# Altium schematic symbol library DT10965_MOTOR_CONTROLLER.SCHLIB: 85 symbols (part 1 of 2)
Pins are listed as number, name and electrical type; pins without a type are passive.

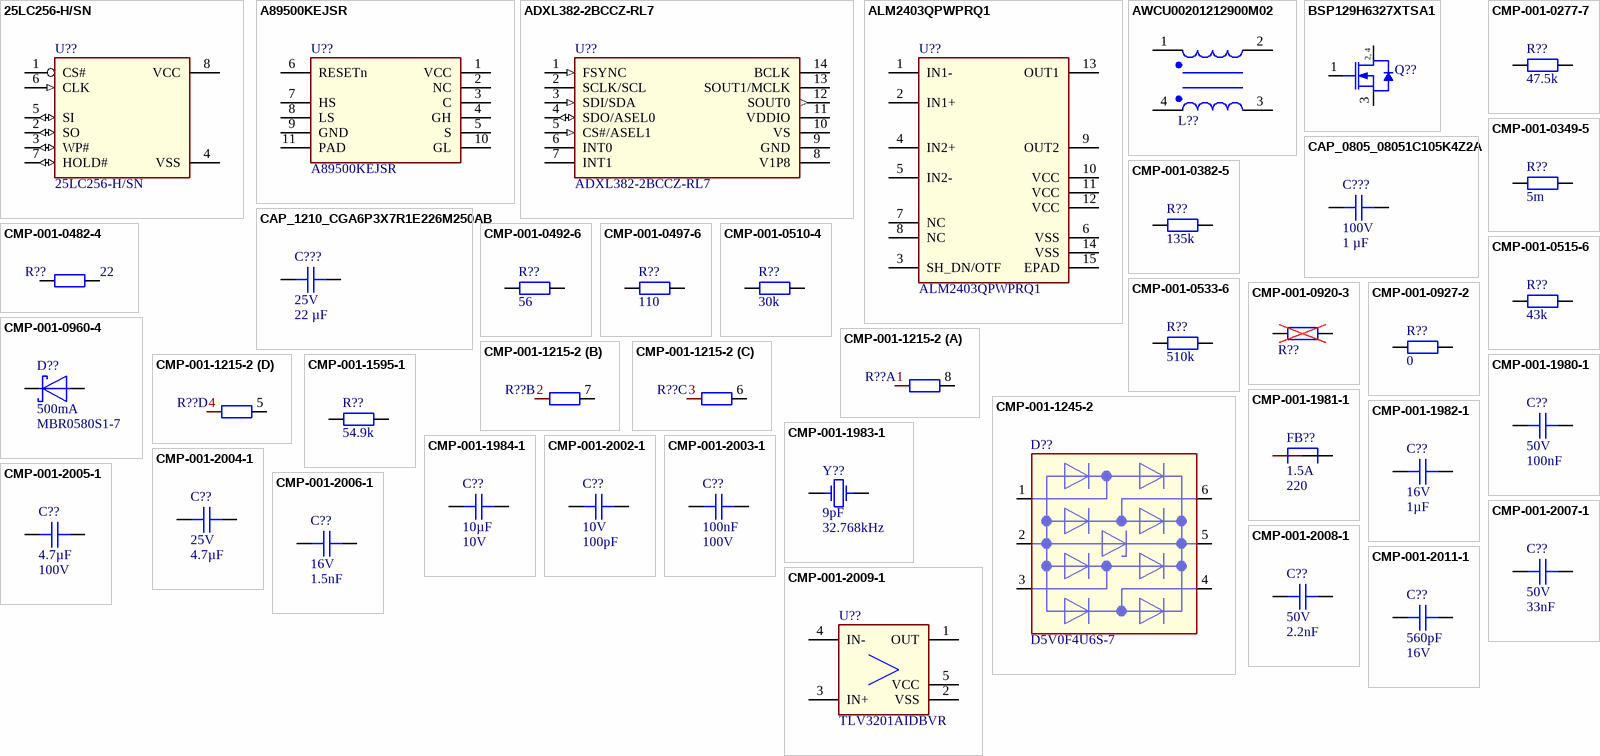
[diagram p0: symbols 25LC256-H/SN to CMP-001-2011-1]

## 25LC256-H/SN
designator U??
IC EEPROM 256KBIT SPI 5MHZ 8SOIC; Manufacturer: Microchip Technology; MPN: 25LC256-H/SN
footprint SOIC8P127_490X600X175L70X41 (SO-8 4.9X6X1.75 p1.27 (JEDEC MS-012-AA))
pins: 1 CS#, 2 SO (io), 3 WP# (io), 4 VSS, 5 SI (io), 6 CLK (in), 7 HOLD# (io), 8 VCC

## A89500KEJSR
designator U??
IC GATE DRVR HALF-BRIDGE 10DFN; Manufacturer: Allegro MicroSystems; MPN: A89500KEJSR
footprint A89500KEJSR
pins: 1 VCC (power), 2 NC, 3 C, 4 GH, 5 S, 6 RESETn, 7 HS, 8 LS, 9 GND (power), 10 GL, 11 PAD

## ADXL382-2BCCZ-RL7
designator U??
Accelerometer X, Y, Z Axis ±15g, 30g, 60g 50Hz ~ 8kHz 14-LGA (2.9x2.8); Manufacturer: Analog Devices Inc.; MPN: ADXL382-2BCCZ-RL7
footprint 14-LGA (2.9x2.8) (ADXL382-2BCCZ-RL7)
pins: 1 FSYNC (in), 2 SCLK/SCL, 3 SDI/SDA (in), 4 SDO/ASEL0 (io), 5 CS#/ASEL1 (in), 6 INT0, 7 INT1, 8 V1P8 (power), 9 GND (power), 10 VS (power), 11 VDDIO (power), 12 SOUT0 (out), 13 SOUT1/MCLK, 14 BCLK

## ALM2403QPWPRQ1
designator U??
IC OPAMP GP 2 CIRCUIT 14HTSSOP; Manufacturer: Texas Instruments; MPN: ALM2403QPWPRQ1
footprint 14-HTSSOP
pins: 1 IN1-, 2 IN1+, 3 SH_DN/OTF, 4 IN2+, 5 IN2-, 6 VSS, 7 NC, 8 NC, 9 OUT2, 10 VCC, 11 VCC, 12 VCC, 13 OUT1, 14 VSS, 15 EPAD

## AWCU00201212900M02
designator L??, comment 2 Line Common Mode Choke  (value not drawn)
CMC 330MA 2LN 90OHM SMD AEC-Q200; Manufacturer: Pulse Electronics; MPN: AWCU00201212900M02
footprint DLW21HN900SQ2L
pins: 1, 2, 3, 4

## BSP129H6327XTSA1
designator Q??  (value not drawn)
MOSFET N-CH 240V 350MA SOT223-4; Manufacturer: Infineon Technologies; MPN: BSP129H6327XTSA1
footprint SOT-223
pins: 1 GATE, 2 DRAIN, 3 SOURCE, 4 DRAIN
text: 2, 4

## CAP_0805_08051C105K4Z2A
designator C???, comment Voltage Rating: 100V  Capacitance: 1 µF  (hidden comment: 08051C105K4Z2A)
CAP CER 1UF 100V X7R 0805; Manufacturer: KYOCERA AVX; Op Temp min: -55°C; Op Temp max: 125°C; Tolerance: ±10%; ComponentLink3URL: https://www.digikey.at/en/products/detail/kyocera-avx/08051C105K4Z2A/9374704; ComponentLink1Description: Datasheet; MPN: 08051C105K4Z2A; Lead Spacing: -; ComponentLink2Description: Mouser; Ratings: AEC-Q200; Size: 2.01mm x 1.25mm; ComponentLink1URL: https://mm.digikey.com/Volume0/opasdata/d220001/medias/docus/6397/AutoMLCC-2952695-DS.pdf; Package: 0805 (2012 Metric); Dielectric: X7R; ComponentLink3Description: Digikey; ComponentLink2URL: https://eu.mouser.com/ProductDetail/KYOCERA-AVX/08051C105K4Z2A?qs=BZBei1rCqCB2WSMz8IvwsA%3D%3D; Height max: 900µm; Mounting Type: SM; Component Type: Ceramic Capacitor
footprint CAP_08051A0R8CAT2A_AVX
pins: 1, 2

## CAP_1210_CGA6P3X7R1E226M250AB
designator C???, comment Voltage Rating: 25V  Capacitance: 22 µF  (hidden comment: CGA6P3X7R1E226M250AB)
CAP CER 22UF 25V X7R 1210; Manufacturer: TDK Corporation; Op Temp max: 125°C; Op Temp min: -55°C; Tolerance: ±20%; ComponentLink3URL: https://www.digikey.at/en/products/detail/tdk-corporation/CGA6P3X7R1E226M250AB/9555472; MPN: CGA6P3X7R1E226M250AB; ComponentLink1URL: https://product.tdk.com/system/files/dam/doc/product/capacitor/ceramic/mlcc/catalog/mlcc_automotive_general_en.pdf; Package: 1210 (3225 Metric); Size: 3.20mm x 2.50mm; Height max: 2.80mm; Mounting Type: SM; ComponentLink1Description: Datasheet; ComponentLink3Description: Digikey; Ratings: AEC-Q200; Dielectric: X7R; Lead Spacing: -; Component Type: Ceramic Capacitor; ComponentLink4Description: Mouser; ComponentLink4URL: https://eu.mouser.com/ProductDetail/TDK/CGA6P3X7R1E226M250AB?qs=w%2Fv1CP2dgqrKXzeuDypldA%3D%3D
footprint CAPC3225X270N
pins: 1, 2

## CMP-001-0277-7
designator R??, comment Resistance: 47.5k  (hidden comment: RC0402FR-0747K5L)
RES 47.5K OHM 1% 1/16W 0402; Manufacturer: YAGEO; Op Temp min: -55°C; Power: 63mW; Temperature Coefficient: ±100ppm; Op Temp max: 155°C; ComponentLink1URL: https://www.yageo.com/upload/media/product/productsearch/datasheet/rchip/PYu-RC_Group_51_RoHS_L_12.pdf; ComponentLink1Description: Datasheet; MPN: RC0402FR-0747K5L; ComponentLink3Description: Digikey; ComponentLink2URL: https://eu.mouser.com/ProductDetail/YAGEO/RC0402FR-0747K5L?qs=V1yeUXFNrklfu86Rfgihxg%3D%3D; Mounting Type: SM; Tolerance: 1%; Package: 0402 (1005 Metric); Height max: 400µm; ComponentLink2Description: Mouser; ComponentLink3URL: https://www.digikey.com/en/products/detail/yageo/RC0402FR-0747K5L/726617; Size: 1.00mm x 0.50mm; Composition: Thick Film; Ratings: -; Component Type: Chip Resistor
footprint RESC100X50X40L25 (EIA 0402 (1005) T0.40 1.00x0.50x0.40)
pins: 1, 2

## CMP-001-0349-5
designator R??, comment Resistance: 5m  (hidden comment: CRE2512-FZ-R005E-3)
RES 0.005 OHM 1% 3W 2512; Manufacturer: Bourns Inc.; Op Temp max: 170°C; Temperature Coefficient: ±50ppm; Op Temp min: -55°C; Power: 3W; Composition: Metal Element; Height max: 900µm; Mounting Type: SM; Ratings: AEC-Q200; Package: 2512 (6432 Metric); ComponentLink3Description: Digikey; ComponentLink3URL: https://www.digikey.com/en/products/detail/bourns-inc/CRE2512-FZ-R005E-3/4900061?s=N4IgTCBcDaIMICUCiYCsBGMBaAYgLSwQAYjUksBmEAXQF8g; ComponentLink2Description: Mouser; MPN: CRE2512-FZ-R005E-3; ComponentLink2URL: https://eu.mouser.com/ProductDetail/Bourns/CRE2512-FZ-R005E-3?qs=rpfKl3ntHzNlYrjx6b2oeg%3D%3D; ComponentLink1Description: Datasheet; ComponentLink1URL: https://www.bourns.com/docs/product-datasheets/cre.pdf; Size: 6.45mm x 3.35mm; Tolerance: 1%; Component Type: Chip Resistor
footprint RESC640X320X80L95 (EIA 2512 (6432) T0.80 6.40x3.20x0.80)
pins: 1, 2

## CMP-001-0382-5
designator R??, comment Resistance: 135k  (hidden comment: RN73H1ETTP1353F50)
RES 135K OHM 1% 1/16W 0402; Manufacturer: KOA Speer Electronics, Inc.; Power: 63mW; Ratings: Automotive AEC-Q200, Moisture Resistant; Op Temp max: 155°C; Temperature Coefficient: ±100ppm; Op Temp min: -55°C; ComponentLink2URL: https://www.koaspeer.com/pdfs/RN73H.pdf; ComponentLink2Description: Mouser; Height max: 400µm; ComponentLink3Description: Digikey; Mounting Type: SM; Composition: Thick Film; Size: 1.00mm x 0.50mm; ComponentLink1URL: https://www.yageo.com/upload/media/product/productsearch/datasheet/rchip/PYu-RC_Group_51_RoHS_L_12.pdf; Tolerance: 1%; ComponentLink1Description: Datasheet; Package: 0402 (1005 Metric); ComponentLink3URL: https://www.digikey.at/en/products/detail/koa-speer-electronics-inc/RN73H1ETTP1353F50/9914841; MPN: RN73H1ETTP1353F50; Component Type: Chip Resistor
footprint RESC100X50X40L25 (EIA 0402 (1005) T0.40 1.00x0.50x0.40)
pins: 1, 2

## CMP-001-0482-4
designator R??, comment Resistance: 22  (hidden comment: RC0402FR-0722RL)
RES 22 OHM 1% 1/16W 0402; Manufacturer: YAGEO; Temperature Coefficient: ±100ppm; Op Temp max: 155°C; Op Temp min: -55°C; Power: 63mW; Ratings: -; ComponentLink3URL: https://www.digikey.com/en/products/detail/yageo/RC0402FR-0722RL/726562; ComponentLink2URL: https://eu.mouser.com/ProductDetail/YAGEO/RC0402FR-0722RL?qs=V1yeUXFNrkkRg6zf08ADKQ%3D%3D; MPN: RC0402FR-0722RL; ComponentLink1Description: Datasheet; ComponentLink3Description: Digikey; Tolerance: 1%; Size: 1.00mm x 0.50mm; ComponentLink1URL: https://www.yageo.com/upload/media/product/productsearch/datasheet/rchip/PYu-RC_Group_51_RoHS_L_12.pdf; Composition: Thick Film; ComponentLink2Description: Mouser; Mounting Type: SM; Package: 0402 (1005 Metric); Height max: 400µm; Component Type: Chip Resistor
footprint RESC100X50X40L25 (EIA 0402 (1005) T0.40 1.00x0.50x0.40)
pins: 1, 2

## CMP-001-0492-6
designator R??, comment Resistance: 56  (hidden comment: RC0402FR-0756RL)
RES 56 OHM 1% 1/16W 0402; Manufacturer: YAGEO; Op Temp min: -55°C; Temperature Coefficient: ±100ppm; Power: 63mW; Op Temp max: 155°C; Size: 1.00mm x 0.50mm; Mounting Type: SM; Height max: 400mm; ComponentLink3Description: Digikey; Tolerance: 1%; Ratings: -; MPN: RC0402FR-0756RL; ComponentLink1URL: https://www.yageo.com/upload/media/product/productsearch/datasheet/rchip/PYu-RC_Group_51_RoHS_L_12.pdf; ComponentLink3URL: https://www.digikey.com/en/products/detail/yageo/RC0402FR-0756RL/726636; ComponentLink2Description: Mouser; Composition: Thick Film; ComponentLink2URL: https://eu.mouser.com/ProductDetail/YAGEO/RC0402FR-0756RL?qs=V1yeUXFNrkmJal7VE1rFjw%3D%3D; ComponentLink1Description: Datasheet; Package: 0402 (1005 Metric); Component Type: Chip Resistor
footprint RESC100X50X40L25 (EIA 0402 (1005) T0.40 1.00x0.50x0.40)
pins: 1, 2

## CMP-001-0497-6
designator R??, comment Resistance: 110  (hidden comment: RC0402FR-07110RL)
RES 110 OHM 1% 1/16W 0402; Manufacturer: YAGEO; Power: 63mW; Op Temp min: -55°C; Op Temp max: 155°C; Temperature Coefficient: ±100ppm; Size: 1.00mm x 0.50mm; ComponentLink1Description: Datasheet; Package: 0402 (1005 Metric); ComponentLink2URL: https://eu.mouser.com/ProductDetail/YAGEO/RC0402FR-07110RL?qs=QWYorlrD8IXj7iGvwWbRbA%3D%3D; MPN: RC0402FR-07110RL; ComponentLink3Description: Digikey; Height max: 400µm; Ratings: -; ComponentLink3URL: https://www.digikey.com/en/products/detail/yageo/RC0402FR-07110RL/2827583; Composition: Thick Film; ComponentLink2Description: Mouser; Tolerance: 1%; Mounting Type: SM; ComponentLink1URL: https://www.yageo.com/upload/media/product/productsearch/datasheet/rchip/PYu-RC_Group_51_RoHS_L_12.pdf; Component Type: Chip Resistor
footprint RESC100X50X40L25 (EIA 0402 (1005) T0.40 1.00x0.50x0.40)
pins: 1, 2

## CMP-001-0510-4
designator R??, comment Resistance: 30k  (hidden comment: RC0402FR-0730KL)
RES 30K OHM 1% 1/16W 0402; Manufacturer: YAGEO; Op Temp max: 155°C; Temperature Coefficient: ±100ppm; Power: 63mW; Op Temp min: -55°C; Tolerance: 1%; Composition: Thick Film; MPN: RC0402FR-0730KL; ComponentLink3Description: Digikey; Package: 0402 (1005 Metric); Size: 1.00mm x 0.50mm; Ratings: -; Mounting Type: SM; ComponentLink2Description: Mouser; ComponentLink3URL: https://www.digikey.com/en/products/detail/yageo/RC0402FR-0730KL/726586; ComponentLink1URL: https://www.yageo.com/upload/media/product/productsearch/datasheet/rchip/PYu-RC_Group_51_RoHS_L_12.pdf; Height max: 400µm; ComponentLink1Description: Datasheet; ComponentLink2URL: https://eu.mouser.com/ProductDetail/YAGEO/RC0402FR-0730KL?qs=YUgVZYePFqD%252BaGg4iT%252Br5g%3D%3D; Component Type: Chip Resistor
footprint RESC100X50X40L25 (EIA 0402 (1005) T0.40 1.00x0.50x0.40)
pins: 1, 2

## CMP-001-0515-6
designator R??, comment Resistance: 43k  (hidden comment: RC0402FR-0743KL)
RES 43K OHM 1% 1/16W 0402; Manufacturer: YAGEO; Op Temp min: -55°C; Temperature Coefficient: ±100ppm; Power: 63mW; Op Temp max: 155°C; Size: 1.00mm x 0.50mm; Package: 0402 (1005 Metric); ComponentLink3URL: https://www.digikey.com/en/products/detail/yageo/RC0402FR-0743KL/726609; ComponentLink1Description: Datasheet; Composition: Thick Film; Mounting Type: SM; Height max: 400µm; ComponentLink2URL: https://eu.mouser.com/ProductDetail/YAGEO/RC0402FR-0743KL?qs=Is6ZsIPfHkZH7Q2ies02Tw%3D%3D; ComponentLink1URL: https://www.yageo.com/upload/media/product/productsearch/datasheet/rchip/PYu-RC_Group_51_RoHS_L_12.pdf; Ratings: -; ComponentLink2Description: Mouser; MPN: RC0402FR-0743KL; ComponentLink3Description: Digikey; Tolerance: 1%; Component Type: Chip Resistor
footprint RESC100X50X40L25 (EIA 0402 (1005) T0.40 1.00x0.50x0.40)
pins: 1, 2

## CMP-001-0533-6
designator R??, comment Resistance: 510k  (hidden comment: RC0402FR-07510KL)
RES 510K OHM 1% 1/16W 0402; Manufacturer: YAGEO; Op Temp max: 155°C; Temperature Coefficient: ±100ppm; Op Temp min: -55°C; Power: 63mW; Package: 0402 (1005 Metric); Composition: Thick Film; Size: 1.00mm x 0.50mm; ComponentLink2Description: Mouser; MPN: RC0402FR-07510KL; Height max: 400µm; ComponentLink1URL: https://www.yageo.com/upload/media/product/productsearch/datasheet/rchip/PYu-RC_Group_51_RoHS_L_12.pdf; ComponentLink2URL: https://eu.mouser.com/ProductDetail/YAGEO/RC0402FR-07510KL?qs=V1yeUXFNrkkq0IeA5n8CcA%3D%3D; Tolerance: 1%; Mounting Type: SM; ComponentLink3Description: Digikey; ComponentLink3URL: https://www.digikey.com/en/products/detail/yageo/RC0402FR-07510KL/726631; Ratings: -; ComponentLink1Description: Datasheet; Component Type: Chip Resistor
footprint RESC100X50X40L25 (EIA 0402 (1005) T0.40 1.00x0.50x0.40)
pins: 1, 2

## CMP-001-0920-3
designator R??, comment DNP chip res 0603  (value not drawn)
DNP res 0603; Mounting Type: SM; MPN: DNP; Package: 0603 (1608 Metric); Component Type: Chip Resistor
footprint RESC160X80X55L30 (EIA 0603 (1608) T0.55 1.60x0.80x0.55)
pins: 1, 2

## CMP-001-0927-2
designator R??, comment Resistance: 0  (hidden comment: RC0603FR-070RL)
RES 0 OHM JUMPER 1/10W 0603; Manufacturer: YAGEO; Op Temp min: -55°C; Op Temp max: 155°C; Power: 100mW; Tolerance: 0%; Height max: 550µm; ComponentLink2URL: https://eu.mouser.com/ProductDetail/YAGEO/RC0603FR-070RL?qs=0yPvnVz5%2FmpDQv43TwvCfw%3D%3D; Temperature Coefficient: -; ComponentLink3Description: Digikey; ComponentLink2Description: Mouser; MPN: RC0603FR-070RL; ComponentLink1URL: https://www.yageo.com/upload/media/product/productsearch/datasheet/rchip/PYu-RC_Group_51_RoHS_L_12.pdf; Ratings: -; Size: 1.60mm x 0.80mm; Composition: Thick Film; Mounting Type: SM; ComponentLink3URL: https://www.digikey.com/en/products/detail/yageo/RC0603FR-070RL/1304008; Package: 0603 (1608 Metric); ComponentLink1Description: Datasheet; Component Type: Chip Resistor
footprint RESC160X80X55L30 (EIA 0603 (1608) T0.55 1.60x0.80x0.55)
pins: 1, 2

## CMP-001-0960-4
designator D??, comment Current - Average Rectified (Io): 500mA  (hidden comment: MBR0580S1-7)
DIODE SCHOTTKY 80V 500MA SOD123; Manufacturer: Diodes Incorporated; Voltage - Forward (Vf) (Max) @ If: 800 mV @ 500 mA; Op Temp max: 175°C; Capacitance: 15pF; Op Temp min: -55°C; Reverse Recovery Time (trr): 0s; Diode Type: Schottky; ComponentLink2URL: https://eu.mouser.com/ProductDetail/Diodes-Incorporated/MBR0580S1-7?qs=jXf%2FRVhl83bQOuXZ5W6icQ%3D%3D; Mounting Type: SM; ComponentLink1Description: Datasheet; MPN: MBR0580S1-7; ComponentLink1URL: https://mm.digikey.com/Volume0/opasdata/d220001/medias/docus/2174/MBR0580S1_R5.pdf; ComponentLink3URL: https://www.digikey.com/en/products/detail/diodes-incorporated/MBR0580S1-7/5080335; Size: 3.65mm x 1.55mm; Voltage - DC Reverse (Vr) (Max): 80V; ComponentLink3Description: Digikey; Package: SOD-123; Height max: 1.35mm; ComponentLink2Description: Mouser; Component Type: Rectifers Single
footprint SOD365X155X135L30X57 (Diodes Inc. SOD123 3.65x1.55x1.35mm)
pins: 1, 2

## CMP-001-1215-2
designator R??, comment EXB-N8V220JX  (value not drawn)
RES ARRAY 4 RES 22 OHM 0804; Manufacturer: Panasonic Electronic Components; Temperature Coefficient: ±200ppm; Number of Resistors: 4; Tolerance: 5%; Op Temp min: -55°C; Power Per Element: 31mW; Op Temp max: 125°C; Resistance: 22; Ratings: -; ComponentLink2Description: Mouser; ComponentLink1Description: Datasheet; Number of Pins: 8; Size: 2.00mm x 1.00mm; ComponentLink3Description: Digikey; Height max: 550µm; ComponentLink2URL: https://eu.mouser.com/ProductDetail/Panasonic/EXB-N8V220JX?qs=bx0%2FPCyAc7556mtSQRzOoA%3D%3D; Resistor-Ratio-Drift: -; ComponentLink1URL: https://industrial.panasonic.com/cdbs/www-data/pdf/AOC0000/AOC0000C14.pdf; Package: 0804, Concave, Long Side Terminals; ComponentLink3URL: https://www.digikey.com/en/products/detail/panasonic-electronic-components/EXB-N8V220JX/671714; Resistor Matching Ratio: -; MPN: EXB-N8V220JX; Mounting Type: SM; Component Type: Resistor Arrays
footprint RESCAV8P50_200X100X55L30X30 (RES ARRAY 2-Sided Concave 0804(2010) 2.00x1.00mm h0.55 p0.5)
part A pins: 1, 8
part B pins: 2, 7
part C pins: 3, 6
part D pins: 4, 5

## CMP-001-1245-2
designator D??, comment D5V0F4U6S-7
TVS DIODE 5.5VWM 12VC SOT363; Manufacturer: Diodes Incorporated; Cap @ Freq: 0.5pF @ 1MHz; Vc: 12V; Op Temp max: 150°C; Unidirectional Channels: 4; P: 200mW; Vbr: 6V; Vrwm: 5.5V; Op Temp min: -55°C; Height max: 1.1mm; ComponentLink3URL: https://www.digikey.com/en/products/detail/diodes-incorporated/D5V0F4U6S-7/7724995?s=N4IgTCBcDaICIFYBqAGAYgFgKoDYDKAtAOwgC6AvkA; Bidirectional Channels: -; Size: 2.15mm x 2.1mm; Mounting Type: SM; ComponentLink1Description: Datasheet; ComponentLink2Description: Mouser; Package: 6-TSSOP, SC-88, SOT-363; MPN: D5V0F4U6S-7; Ratings: -; ComponentLink1URL: https://www.diodes.com/assets/Datasheets/D5V0F4U6S.pdf; ComponentLink2URL: https://eu.mouser.com/ProductDetail/Diodes-Incorporated/D5V0F4U6S-7?qs=L1DZKBg7t5HMc2d93K7aHQ%3D%3D; ComponentLink3Description: Digikey; Component Type: TVS - Diodes
footprint SOP6P65_200X210X90L85X20 (Nexperia 2.00x2.10x0.90 p0.65 TSSOP6, SOT363, SC-88)
pins: 1, 2, 3, 4, 5, 6

## CMP-001-1595-1
designator R??, comment Resistance: 54.9k  (hidden comment: RC0402FR-0754K9L)
RES 54.9K OHM 1% 1/16W 0402; Manufacturer: YAGEO; Op Temp max: 155°C; Power: 63mW; Op Temp min: -55°C; Temperature Coefficient: ±100ppm; Size: 1.00mm x 0.50mm; Composition: Thick Film; Ratings: -; ComponentLink1Description: Datasheet; Tolerance: 1%; ComponentLink2URL: https://eu.mouser.com/ProductDetail/YAGEO/RC0402FR-0754K9L?qs=4PGqJHn8QVJggq6NOjvQiQ%3D%3D; Package: 0402 (1005 Metric); ComponentLink3URL: https://www.digikey.com/en/products/detail/yageo/RC0402FR-0754K9L/5281045; Mounting Type: SM; MPN: RC0402FR-0754K9L; ComponentLink3Description: Digikey; ComponentLink2Description: Mouser; Height max: 400µm; ComponentLink1URL: https://www.yageo.com/upload/media/product/products/datasheet/rchip/PYu-RC_Group_51_RoHS_L_12.pdf; Component Type: Chip Resistor
footprint RESC100X50X40L25 (EIA 0402 (1005) T0.40 1.00x0.50x0.40)
pins: 1, 2

## CMP-001-1980-1
designator C??, comment Voltage Rating: 50V  Capacitance: 100nF  (hidden comment: GCM155L8EH104KE07D)
CAP CER 0.1UF 50V X8L 0402; Manufacturer: Murata Electronics; Op Temp max: 150°C; Op Temp min: -55°C; Tolerance: 10%; Height max: 550µm; ComponentLink3Description: Digikey; Mounting Type: SM; ComponentLink3URL: https://www.digikey.com/en/products/detail/murata-electronics/GCM155L8EH104KE07D/11618823; Package: 0402 (1005 Metric); Lead Spacing: 0mm; MPN: GCM155L8EH104KE07D; Size: 1.00mm x 0.50mm; Ratings: AEC-Q200; ComponentLink1URL: https://search.murata.co.jp/Ceramy/image/img/A01X/G101/ENG/GCM155L8EH104KE07-01.pdf; ComponentLink1Description: Datasheet; Dielectric: X8L; ComponentLink2Description: Mouser; ComponentLink2URL: https://eu.mouser.com/ProductDetail/Murata-Electronics/GCM155L8EH104KE07D?qs=1mbolxNpo8fQSHf0HYnZWw%3D%3D; Component Type: Ceramic Capacitor
footprint CAPC100x50x50L25 (EIA 0402 (1005) T0.50 1.00x0.50x0.50)
pins: 1, 2

## CMP-001-1981-1
designator FB??, comment Imax: 1.5A  Impedance: 220  (hidden comment: BLM18KG221BH1D)
FERRITE BEAD 220 OHM 0603 1LN; Manufacturer: Murata Electronics; DCR: 50m; Op Temp min: -55°C; Frequency: 100MHz; Op Temp max: 150°C; Number of Lines: 1; Mounting Type: SM; Size: 1.60mm x 0.80mm; ComponentLink2URL: https://eu.mouser.com/ProductDetail/Murata-Electronics/BLM18KG221BH1D?qs=sJ5gq5MLFXpgEHYBdWUtkQ%3D%3D; ComponentLink1Description: Datasheet; ComponentLink1URL: https://www.murata.com/en-us/products/productdata/8798137286686/QNFA9129.pdf; Lead Spacing: 0mm; Ratings: AEC-Q200; ComponentLink3Description: Digikey; ComponentLink3URL: https://www.digikey.com/en/products/detail/murata-electronics/BLM18KG221BH1D/6156000; Height max: 950µm; Package: 0603 (1608 Metric); ComponentLink2Description: Mouser; MPN: BLM18KG221BH1D; Component Type: Ferrite Beads and Chips
footprint BEADC160X80X95L40 (EIA 0603 (1608) 1.60x0.80x0.95 Ferrite Bead)
pins: 1, 2

## CMP-001-1982-1
designator C??, comment Voltage Rating: 16V  Capacitance: 1µF  (hidden comment: GCG188L8EE105KA07D)
CAP CER 1UF 16V X8L 0603; Manufacturer: Murata Electronics; Tolerance: 10%; Op Temp min: -55°C; Op Temp max: 150°C; ComponentLink3URL: https://www.digikey.com/en/products/detail/murata-electronics/GCG188L8EE105KA07D/10695125; Package: 0603 (1608 Metric); MPN: GCG188L8EE105KA07D; ComponentLink2URL: https://eu.mouser.com/ProductDetail/Murata-Electronics/GCG188L8EE105KA07D?qs=rrS6PyfT74dFMfTR80dVTA%3D%3D; Dielectric: X8L; Size: 1.60mm x 0.80mm; ComponentLink1Description: Datasheet; ComponentLink1URL: https://search.murata.co.jp/Ceramy/image/img/A01X/G101/ENG/GCG188L8EE105KA07-01.pdf; ComponentLink2Description: Mouser; Height max: 900µm; Mounting Type: SM; ComponentLink3Description: Digikey; Lead Spacing: 0mm; Ratings: AEC-Q200; Component Type: Ceramic Capacitor
footprint CAPC160X80X90L35 (EIA 0603 (1608) T0.90 1.60x0.80x0.90)
pins: 1, 2

## CMP-001-1983-1
designator Y??, comment C load: 9pF  F: 32.768kHz  (hidden comment: ABS07AIG-32.768KHZ-9-1-T)
CRYSTAL 32.7680KHZ 9PF SMD; Manufacturer: Abracon LLC; ESR: 80k; Op Temp max: 125°C; Op Temp min: -40°C; F Tolerance: ±10ppm; Height max: 900µm; ComponentLink2Description: Mouser; Mounting Type: SM; ComponentLink3Description: Digikey; MPN: ABS07AIG-32.768KHZ-9-1-T; ComponentLink1URL: https://abracon.com/datasheets/ABS07AIG.pdf; ComponentLink2URL: https://eu.mouser.com/ProductDetail/ABRACON/ABS07AIG-32.768KHZ-9-1-T?qs=gG6m684uYP5Ouz7KwhjT2A%3D%3D; ComponentLink1Description: Datasheet; Size: 3.20mm x 1.50mm; ComponentLink3URL: https://www.digikey.com/en/products/detail/abracon-llc/ABS07AIG-32-768KHZ-9-1-T/5817553; Package: 2-SMD, No Lead; F Stability: -; Ratings: AEC-Q200; Component Type: Crystals
footprint XTALDFN2_320X150X85L75X150 (Crystal 3.20x1.50x0.85mm DFN 2-SMD)
pins: 1, 2

## CMP-001-1984-1
designator C??, comment Capacitance: 10µF  Voltage Rating: 10V  (hidden comment: CGA4J1X8L1A106K125AC)
CAP CER 10UF 10V X8L 0805; Manufacturer: TDK Corporation; Tolerance: 10%; Op Temp min: -55°C; Op Temp max: 150°C; ComponentLink3Description: Digikey; Mounting Type: SM; Ratings: AEC-Q200; ComponentLink1Description: Datasheet; ComponentLink3URL: https://www.digikey.com/en/products/detail/tdk-corporation/CGA4J1X8L1A106K125AC/9991388; Lead Spacing: 0mm; MPN: CGA4J1X8L1A106K125AC; Size: 2.00mm x 1.25mm; Height max: 1.5mm; ComponentLink2URL: https://eu.mouser.com/ProductDetail/TDK/CGA4J1X8L1A106K125AC?qs=gZXFycFWdANzH%252B2UvJJjtQ%3D%3D; Package: 0805 (2012 Metric); ComponentLink2Description: Mouser; Dielectric: X8L; ComponentLink1URL: https://product.tdk.com/system/files/dam/doc/product/capacitor/ceramic/mlcc/catalog/mlcc_automotive_hightemp_en.pdf; Component Type: Ceramic Capacitor
footprint CAPC200X125X145L50 (EIA 0805 (2012) T1.45 2.00x1.25x1.45)
pins: 1, 2

## CMP-001-2002-1
designator C??, comment Voltage Rating: 10V  Capacitance: 100pF  (hidden comment: C0603C101K8HACAUTO)
CAP CER 0603 100PF 10V ULTRA STA; Manufacturer: KEMET; Dielectric: X8R; Op Temp max: 150°C; Op Temp min: -55°C; Tolerance: 10%; ComponentLink2Description: Mouser; Height max: 870µm; ComponentLink3Description: Digikey; ComponentLink3URL: https://www.digikey.com/en/products/detail/kemet/C0603C101K8HACAUTO/7957168; ComponentLink2URL: https://eu.mouser.com/ProductDetail/KEMET/C0603C101K8HACAUTO?qs=j%252B1pi9TdxUaad%2FlKIn1CPA%3D%3D; Lead Spacing: 0mm; Package: 0603 (1608 Metric); MPN: C0603C101K8HACAUTO; Mounting Type: SM; ComponentLink1URL: https://content.kemet.com/datasheets/KEM_C1007_X8R_ULTRA_150C_SMD.pdf; Ratings: AEC-Q200; Size: 1.60mm x 0.80mm; ComponentLink1Description: Datasheet; Component Type: Ceramic Capacitor
footprint CAPC160X80X90L35 (EIA 0603 (1608) T0.90 1.60x0.80x0.90)
pins: 1, 2

## CMP-001-2003-1
designator C??, comment Capacitance: 100nF  Voltage Rating: 100V  (hidden comment: GCJ188L8EL104KA07D)
CAP CER 0.1UF 100V X8L 0603; Manufacturer: Murata Electronics; Tolerance: 10%; Op Temp min: -55°C; Op Temp max: 150°C; Package: 0603 (1608 Metric); ComponentLink3URL: https://www.digikey.com/en/products/detail/murata-electronics/GCJ188L8EL104KA07D/11618648; Lead Spacing: 0mm; ComponentLink1Description: Datasheet; ComponentLink1URL: https://www.murata.com/en-sg/api/pdfdownloadapi?cate=luCeramicCapacitorsSMD&partno=GCJ188L8EL104KA07%23; ComponentLink3Description: Digikey; MPN: GCJ188L8EL104KA07D; Ratings: AEC-Q200; ComponentLink2Description: Mouser; Height max: 900µm; Dielectric: X8L; Mounting Type: SM; ComponentLink2URL: https://eu.mouser.com/ProductDetail/Murata-Electronics/GCJ188L8EL104KA07D?qs=rrS6PyfT74fTpbPMbkPm2A%3D%3D; Size: 1.60mm x 0.80mm; Component Type: Ceramic Capacitor
footprint CAPC160X80X90L35 (EIA 0603 (1608) T0.90 1.60x0.80x0.90)
pins: 1, 2

## CMP-001-2004-1
designator C??, comment Voltage Rating: 25V  Capacitance: 4.7µF  (hidden comment: CGA4J1X8L1E475K125AC)
CAP CER 4.7UF 25V X8L 0805; Manufacturer: TDK Corporation; Op Temp max: 150°C; Op Temp min: -55°C; Tolerance: 10%; ComponentLink1URL: https://product.tdk.com/system/files/dam/doc/product/capacitor/ceramic/mlcc/catalog/mlcc_automotive_hightemp_en.pdf; Package: 0805 (2012 Metric); Size: (2.00mm x 1.25mm; Height max: 1.5mm; Lead Spacing: 0mm; Ratings: AEC-Q200; ComponentLink1Description: Datasheet; ComponentLink3Description: Digikey; MPN: CGA4J1X8L1E475K125AC; Mounting Type: SM; ComponentLink2URL: https://eu.mouser.com/ProductDetail/TDK/CGA4J1X8L1E475K125AC?qs=gZXFycFWdANxpKJOMQuJTA%3D%3D; ComponentLink3URL: https://www.digikey.com/en/products/detail/tdk-corporation/CGA4J1X8L1E475K125AC/9991390; ComponentLink2Description: Mouser; Dielectric: X8L; Component Type: Ceramic Capacitor
footprint CAPC200X125X145L50 (EIA 0805 (2012) T1.45 2.00x1.25x1.45)
pins: 1, 2

## CMP-001-2005-1
designator C??, comment Capacitance: 4.7µF  Voltage Rating: 100V  (hidden comment: CL32E475KCIVPJE)
CAP CER 4.7UF 100V X8L 1210; Manufacturer: Samsung Electro-Mechanics; Op Temp min: -55°C; Tolerance: 10%; Op Temp max: 150°C; Lead Spacing: 0mm; ComponentLink3Description: Digikey; ComponentLink1Description: Datasheet; ComponentLink3URL: https://www.digikey.com/en/products/detail/samsung-electro-mechanics/CL32E475KCIVPJE/20498500; Ratings: AEC-Q200; ComponentLink2URL: https://eu.mouser.com/ProductDetail/Samsung-Electro-Mechanics/CL32E475KCIVPJE?qs=Imq1NPwxi77B1%252BqSJu7fiA%3D%3D; ComponentLink1URL: https://mm.digikey.com/Volume0/opasdata/d220001/medias/docus/5458/CL32E475KCIVPJE_Spec.pdf; MPN: CL32E475KCIVPJE; Mounting Type: SM; Size: 3.20mm x 2.50mm; Dielectric: X8L; ComponentLink2Description: Mouser; Package: 1210 (3225 Metric); Height max: 2.3mm; Component Type: Ceramic Capacitor
footprint CAPC320X250X250L60 (EIA 1210 (3225) T2.50 3.20x2.50x2.50)
pins: 1, 2

## CMP-001-2006-1
designator C??, comment Voltage Rating: 16V  Capacitance: 1.5nF  (hidden comment: C0402C152F4HACAUTO)
CAP CER 0402 1.5NF 16V ULTRA STA; Manufacturer: KEMET; Op Temp min: -55°C; Op Temp max: 150°C; Dielectric: X8R; Tolerance: 1%; Ratings: AEC-Q200; Lead Spacing: 0mm; Package: 0402 (1005 Metric); Size: 1.00mm x 0.50mm; ComponentLink3URL: https://www.digikey.com/en/products/detail/kemet/C0402C152F4HACAUTO/7955197?s=N4IgjCBcpgLFoDGUBmBDANgZwKYBoQB7KAbXAAYAOAdlgCYQBdAgBwBcoQBlNgJwEsAdgHMQAXwJgAbAhDJI6bPiKkQAZgCcYAKyUmrDpG58hoiSDraG0Oaky4CxSGTr0NaiMxDtOPASPECanJqWXlFBxVndTA6MHJtfW9DY38zSQ1KDTC7JUdVciZzOnJYbJtw%2B2UnMh1ycgACFgAxJJ8jAFVBfjYAeRQAWRw0LABXXhxAkABaayQoPlHq1UTGMWLVOvIWFCKgA; ComponentLink2Description: Mouser; ComponentLink3Description: Digikey; ComponentLink1URL: https://content.kemet.com/datasheets/KEM_C1007_X8R_ULTRA_150C_SMD.pdf; Mounting Type: SM; MPN: C0402C152F4HACAUTO; Height max: 550µm; ComponentLink1Description: Datasheet; ComponentLink2URL: https://eu.mouser.com/ProductDetail/KEMET/C0402C152F4HACAUTO?qs=j%252B1pi9TdxUbEW1hCqLU6QA%3D%3D; Component Type: Ceramic Capacitor
footprint CAPC100x50x50L25 (EIA 0402 (1005) T0.50 1.00x0.50x0.50)
pins: 1, 2

## CMP-001-2007-1
designator C??, comment Voltage Rating: 50V  Capacitance: 33nF  (hidden comment: GCM155L8EH333KE07D)
CAP CER 0.033UF 50V X8L 0402; Manufacturer: Murata Electronics; Op Temp max: 150°C; Tolerance: 10%; Op Temp min: -55°C; ComponentLink1URL: https://search.murata.co.jp/Ceramy/image/img/A01X/G101/ENG/GCM155L8EH333KE07-01A.pdf; Mounting Type: SM; Dielectric: X8L; ComponentLink3URL: https://www.digikey.com/en/products/detail/murata-electronics/GCM155L8EH333KE07D/17845188; Size: 1.00mm x 0.50mm; ComponentLink1Description: Datasheet; ComponentLink3Description: Digikey; Package: 0402 (1005 Metric); MPN: GCM155L8EH333KE07D; ComponentLink2Description: Mouser; Height max: 550µm; Lead Spacing: 0mm; ComponentLink2URL: https://eu.mouser.com/ProductDetail/Murata-Electronics/GCM155L8EH333KE07D?qs=rrS6PyfT74cZK6FfR7MiFw%3D%3D; Ratings: AEC-Q200; Component Type: Ceramic Capacitor
footprint CAPC100x50x50L25 (EIA 0402 (1005) T0.50 1.00x0.50x0.50)
pins: 1, 2

## CMP-001-2008-1
designator C??, comment Voltage Rating: 50V  Capacitance: 2.2nF  (hidden comment: CGA2B2X8R1H222K050BA)
CAP CER 2200PF 50V X8R 0402; Manufacturer: TDK Corporation; Op Temp max: 150°C; Op Temp min: -55°C; Tolerance: 10%; Size: 1.00mm x 0.50mm; ComponentLink1URL: https://product.tdk.com/system/files/dam/doc/product/capacitor/ceramic/mlcc/catalog/mlcc_automotive_hightemp_en.pdf; ComponentLink3Description: Digikey; Mounting Type: SM; Ratings: AEC-Q200; ComponentLink3URL: https://www.digikey.com/en/products/detail/tdk-corporation/CGA2B2X8R1H222K050BA/2443359; Dielectric: X8R; ComponentLink2URL: https://eu.mouser.com/ProductDetail/TDK/CGA2B2X8R1H222K050BA?qs=NRhsANhppD9e0pyGSMWEuA%3D%3D; Height max: 550µm; ComponentLink1Description: Datasheet; Package: 0402 (1005 Metric); ComponentLink2Description: Mouser; MPN: CGA2B2X8R1H222K050BA; Lead Spacing: 0mm; Component Type: Ceramic Capacitor
footprint CAPC100x50x50L25 (EIA 0402 (1005) T0.50 1.00x0.50x0.50)
pins: 1, 2

## CMP-001-2009-1
designator U??, comment TLV3201AIDBVR
IC COMPARATOR 1 GEN PUR SOT23-5; Manufacturer: Texas Instruments; Op Temp max: 125°C; Current - Quiescent (Max): 40µA; Output Type: Push-Pull; Propagation Delay (Max): 50ns; Number of Elements: 1; Op Temp min: -40°C; Hysteresis: 1.2mV; Current - Input Bias (Max): 0.005µA @ 5V; Voltage - Input Offset (Max): 1mV @ 5V; CMRR, PSRR (Typ): 70dB CMRR, 85dB PSRR; Current - Output (Typ): 21mA; Voltage - Supply, Single/Dual (±): 2.7V ~ 5.5V; ComponentLink1Description: Datasheet; ComponentLink1URL: https://www.ti.com/lit/ds/symlink/tlv3201.pdf?HQS=dis-dk-null-digikeymode-dsf-pf-null-wwe&ts=1745660417910&ref_url=https%253A%252F%252Fwww.ti.com%252Fgeneral%252Fdocs%252Fsuppproductinfo.tsp%253FdistId%253D10%2526gotoUrl%253Dhttps%253A%252F%252Fwww.ti.com%252Flit%252Fgpn%252Ftlv3201; ComponentLink2Description: Mouser; Mounting Type: SM; ComponentLink3URL: https://www.digikey.com/en/products/detail/texas-instruments/TLV3201AIDBVR/3188691?s=N4IgTCBcDaICoBkBqBmMAGAjAQQJIBEAhJAJRAF0BfIA; ComponentLink2URL: https://eu.mouser.com/ProductDetail/Texas-Instruments/TLV3201AIDBVR?qs=5771e39Rz9GGuYwPEKy7fA%3D%3D; ComponentLink3Description: Digikey; Package: SC-74A, SOT-753; Ratings: -; MPN: TLV3201AIDBVR; Component Type: Linear Comparators
footprint SOP5P95_290X280X145L45X40 (TSOP5 2.9x1.6x1.45mm p0.95 (JEDEC MO-178AA) SOT-23-5)
pins: 1 OUT, 2 VSS, 3 IN+, 4 IN-, 5 VCC

## CMP-001-2011-1
designator C??, comment Capacitance: 560pF  Voltage Rating: 16V  (hidden comment: C0402C561F4HACAUTO)
CAP CER 0402 560PF 16V ULTRA STA; Manufacturer: KEMET; Dielectric: X8R; Tolerance: 1%; Op Temp max: 150°C; Op Temp min: -55°C; Package: 0402 (1005 Metric); MPN: C0402C561F4HACAUTO; ComponentLink3Description: Digikey; Mounting Type: SM; Height max: 550µm; Lead Spacing: 0mm; ComponentLink1Description: Datasheet; ComponentLink3URL: https://www.digikey.com/en/products/detail/kemet/C0402C561F4HACAUTO/7955183?s=N4IgjCBcpgbFoDGUBmBDANgZwKYBoQB7KAbRAGYBOMAVgA4QBdAgBwBcoQBlNgJwEsAdgHMQAXwJgA7AhDJI6bPiKkQAFgBMGzfGYh2nHgJHiCGmhtnzFuAsUhltGyuQh6DkbnyGiJ4SnSUVqiYtioOIAAMTH4akWpB0HIhSnaqNLCRAAQsAGJMrByeAKqC-GwA8igAsjhoWACuvDimIAC0lknyfA3K9mQ0MbHpmSwoMUA; ComponentLink2URL: https://eu.mouser.com/ProductDetail/KEMET/C0402C561F4HACAUTO?qs=j%252B1pi9TdxUZljUlO6hXHJQ%3D%3D; ComponentLink2Description: Mouser; ComponentLink1URL: https://content.kemet.com/datasheets/KEM_C1007_X8R_ULTRA_150C_SMD.pdf; Ratings: AEC-Q200; Size: 1.00mm x 0.50mm; Component Type: Ceramic Capacitor
footprint CAPC100x50x50L25 (EIA 0402 (1005) T0.50 1.00x0.50x0.50)
pins: 1, 2

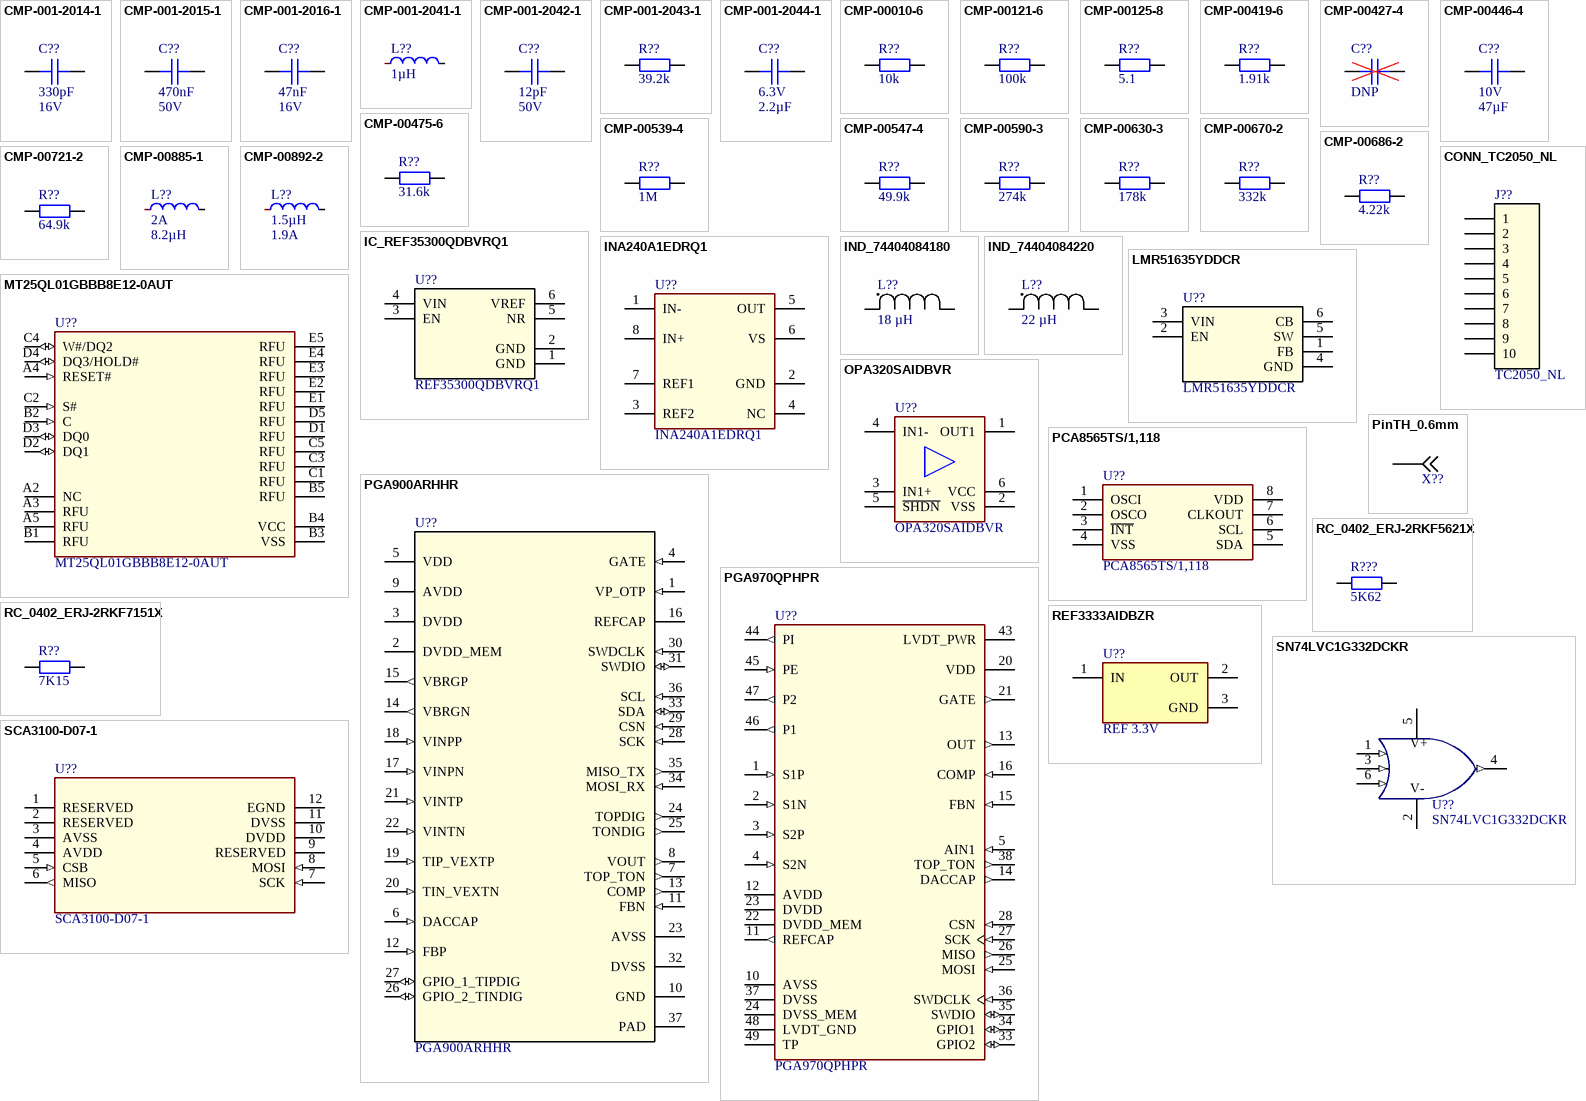
[diagram p1: symbols CMP-001-2014-1 to SN74LVC1G332DCKR]

## CMP-001-2014-1
designator C??, comment Capacitance: 330pF  Voltage Rating: 16V  (hidden comment: C0603C331J4HACTU)
CAP CER 330PF 16V X8R 0603; Manufacturer: KEMET; Op Temp max: 150°C; Tolerance: 5%; Op Temp min: -55°C; ComponentLink2URL: https://eu.mouser.com/ProductDetail/KEMET/C0603C331J4HACTU?qs=W0yvOO0ixfGIN%252BOCnjHNiQ%3D%3D; MPN: C0603C331J4HACTU; Ratings: -; Height max: 870µm; ComponentLink1Description: Datasheet; ComponentLink3URL: https://www.digikey.com/en/products/detail/kemet/C0603C331J4HACTU/7946553?s=N4IgjCBcpgLFoDGUBmBDANgZwKYBoQB7KAbXAAYAOAdlgCYQBdAgBwBcoQBlNgJwEsAdgHMQAXwJ0ArA2ghkkdNnxFSIOvQCcAZgjMQ7TjwEjxBMJsqaE81JlwFikMuSYT15WNbkKlD1c4g2trkAAQsAGJMrByQIACqgvxsAPIoALI4aFgArrw4ZiAAtLJIUHw5Kk5kUiAE1ozuRd5lkBVVanpi3UA; Size: 1.60mm x 0.80mm; ComponentLink2Description: Mouser; Package: 0603 (1608 Metric); ComponentLink3Description: Digikey; Lead Spacing: 0mm; Mounting Type: SM; Dielectric: X8R; ComponentLink1URL: https://search.kemet.com/download/datasheet/C0603C331J4HAC7867; Component Type: Ceramic Capacitor
footprint CAPC160X80X90L35 (EIA 0603 (1608) T0.90 1.60x0.80x0.90)
pins: 1, 2

## CMP-001-2015-1
designator C??, comment Capacitance: 470nF  Voltage Rating: 50V  (hidden comment: CGA4J1X8L1H474K125AC)
CAP CER 0.47UF 50V X8L 0805; Manufacturer: TDK Corporation; Op Temp min: -55°C; Tolerance: 10%; Op Temp max: 150°C; ComponentLink1Description: Datasheet; Size: 2.00mm x 1.25mm; Dielectric: X8L; ComponentLink3URL: https://www.digikey.com/en/products/detail/tdk-corporation/CGA4J1X8L1H474K125AC/12807037?s=N4IgjCBcoKxaBjKAzAhgGwM4FMA0IB7KAbRAGYYAWAdgA5KQBdfABwBcoQBlNgJwEsAdgHMQAX3xgG0EEkhoseQiRAAmMrWoamrDpG58hoieABs8WSgw58RSKTIBOMqsc6Q7TjwEjx%2BU24ycgo2yvYglAAMjpRg5sweegY%2BxviqMKoWwdZKdqSqlK5kEGmFztQgpa6xlWpllLTunvreRn7gjrSBiFaKtiqRTCaqkZTdlvI5-eGRAHQ0AAQArQBitTSRC4JrCc0gAKqC-GwA8sgAstiomACuvNjtALSZQVB8N7kqcPhujCaP4zk70%2B4QgfzEYiAA; Ratings: AEC-Q200; ComponentLink3Description: Digikey; ComponentLink2Description: Mouser; Mounting Type: SM; Lead Spacing: 0mm; ComponentLink1URL: https://product.tdk.com/system/files/dam/doc/product/capacitor/ceramic/mlcc/catalog/mlcc_automotive_hightemp_en.pdf; MPN: CGA4J1X8L1H474K125AC; Height max: 1.45mm; ComponentLink2URL: https://eu.mouser.com/ProductDetail/TDK/CGA4J1X8L1H474K125AC?qs=W%2FMpXkg%252BdQ5d8zdfD6mokw%3D%3D; Package: 0805 (2012 Metric); Component Type: Ceramic Capacitor
footprint CAPC200X125X145L50 (EIA 0805 (2012) T1.45 2.00x1.25x1.45)
pins: 1, 2

## CMP-001-2016-1
designator C??, comment Capacitance: 47nF  Voltage Rating: 16V  (hidden comment: CGA2B3X8R1C473K050BB)
CAP CER 0.047UF 16V X8R 0402; Manufacturer: TDK Corporation; Op Temp min: -55°C; Op Temp max: 150°C; Tolerance: 10%; Lead Spacing: 0mm; ComponentLink2Description: Mouser; ComponentLink2URL: https://eu.mouser.com/ProductDetail/TDK/CGA2B3X8R1C473K050BB?qs=7GgVL%252Bg%252BDME3TQb%252Bbj%2FjaA%3D%3D; ComponentLink1Description: Datasheet; ComponentLink3URL: https://www.digikey.com/en/products/detail/tdk-corporation/CGA2B3X8R1C473K050BB/3949531; Dielectric: X8R; ComponentLink3Description: Digikey; Height max: 550µm; ComponentLink1URL: https://product.tdk.com/system/files/dam/doc/product/capacitor/ceramic/mlcc/catalog/mlcc_automotive_hightemp_en.pdf; MPN: CGA2B3X8R1C473K050BB; Ratings: AEC-Q200; Size: 1.00mm x 0.50mm; Package: 0402 (1005 Metric); Mounting Type: SM; Component Type: Ceramic Capacitor
footprint CAPC100x50x50L25 (EIA 0402 (1005) T0.50 1.00x0.50x0.50)
pins: 1, 2

## CMP-001-2041-1
designator L??, comment Inductance: 1µH  (hidden comment: DFE2HCAH1R0MJ0L)
FIXED IND 1UH 3A 50 MOHM SMD; Manufacturer: Murata Electronics; Fsr: 79MHz; Shielding: Shielded; Material - Core: Metal; DCR: 50m; Type: Drum Core, Wirewound; Op Temp min: -40°C; Isat: 3.4A; Tolerance: 20%; Op Temp max: 150°C; Height max: 1.2mm; I: 3A; ComponentLink1URL: https://www.murata.com/en-us/products/productdetail?partno=DFE2HCAH1R0MJ0%23; ComponentLink1Description: Datasheet; Lead Spacing: 0mm; ComponentLink3URL: https://www.digikey.com/en/products/detail/murata-electronics/DFE2HCAH1R0MJ0L/10135180; ComponentLink2URL: https://eu.mouser.com/ProductDetail/Murata-Electronics/DFE2HCAH1R0MJ0L?qs=17u8i%2FzlE8%2FsfvqDr48AMQ%3D%3D; Ratings: AEC-Q200; ComponentLink3Description: Digikey; Package: 1008 (2520 Metric); ComponentLink2Description: Mouser; MPN: DFE2HCAH1R0MJ0L; Size: 2.50mm x 2.00mm; Mounting Type: SM; Component Type: Fixed Inductors
footprint INDC250X200X120L60 (EIA 1008 (2520) T1.20 2.50x2.00x1.20 Chip Inductor)
pins: 1, 2

## CMP-001-2042-1
designator C??, comment Capacitance: 12pF  Voltage Rating: 50V  (hidden comment: C0402C120J5HACAUTO)
CAP CER 0402 12PF 50V ULTRA STAB; Manufacturer: KEMET; Tolerance: 5%; Op Temp min: -55°C; Dielectric: X8R; Op Temp max: 155°C; ComponentLink3URL: https://www.digikey.com/en/products/detail/kemet/C0402C120J5HACAUTO/7955501; ComponentLink1Description: Datasheet; ComponentLink2URL: https://eu.mouser.com/ProductDetail/KEMET/C0402C120J5HACAUTO?qs=j%252B1pi9TdxUZTSOjjZ2f5wA%3D%3D; Size: 1.00mm x 0.50mm; ComponentLink2Description: Mouser; Ratings: AEC-Q200; ComponentLink3Description: Digikey; Mounting Type: SM; Lead Spacing: 0mm; MPN: C0402C120J5HACAUTO; ComponentLink1URL: https://content.kemet.com/datasheets/KEM_C1007_X8R_ULTRA_150C_SMD.pdf; Height max: 500µm; Package: 0402 (1005 Metric); Component Type: Ceramic Capacitor
footprint CAPC100x50x50L25 (EIA 0402 (1005) T0.50 1.00x0.50x0.50)
pins: 1, 2

## CMP-001-2043-1
designator R??, comment Resistance: 39.2k  (hidden comment: RMCF0402FT39K2)
RES 39.2K OHM 1% 1/16W 0402; Manufacturer: Stackpole Electronics Inc; Op Temp min: -55°C; Temperature Coefficient: ±100ppm; Power: 63mW; Op Temp max: 155°C; ComponentLink1Description: Datasheet; Composition: Thick Film; ComponentLink1URL: https://www.seielect.com/catalog/sei-rmcf_rmcp.pdf; Package: 0402 (1005 Metric); ComponentLink3Description: Digikey; Tolerance: 1%; ComponentLink2Description: Mouser; MPN: RMCF0402FT39K2; Height max: 400µm; Ratings: AEC-Q200; ComponentLink2URL: https://eu.mouser.com/ProductDetail/SEI-Stackpole/RMCF0402FT39K2?qs=IPgv5n7u5QZ19xDSJPwVdQ%3D%3D; ComponentLink3URL: https://www.digikey.com/en/products/detail/stackpole-electronics-inc/RMCF0402FT39K2/1761390; Mounting Type: SM; Size: 1.00mm x 0.50mm; Component Type: Chip Resistor
footprint RESC100X50X40L25 (EIA 0402 (1005) T0.40 1.00x0.50x0.40)
pins: 1, 2

## CMP-001-2044-1
designator C??, comment Voltage Rating: 6.3V  Capacitance: 2.2µF  (hidden comment: C1608X8L0J225K080AC)
CAP CER 2.2UF 6.3V X8L 0603; Manufacturer: TDK Corporation; Op Temp min: -55°C; Tolerance: 10%; Op Temp max: 150°C; ComponentLink1URL: https://product.tdk.com/en/search/capacitor/ceramic/mlcc/info?part_no=C1608X8L0J225K080AC; MPN: C1608X8L0J225K080AC; ComponentLink3URL: https://www.digikey.com/en/products/detail/tdk-corporation/C1608X8L0J225K080AC/8343784; ComponentLink1Description: Datasheet; Lead Spacing: 0mm; ComponentLink3Description: Digikey; Package: 0603 (1608 Metric); Height max: 900µm; Size: 1.60mm x 0.80mm; Dielectric: X8L; Ratings: -; Mounting Type: SM; ComponentLink2URL: https://eu.mouser.com/ProductDetail/TDK/C1608X8L0J225K080AC?qs=rrS6PyfT74dgREMaiAoT3Q%3D%3D; ComponentLink2Description: Mouser; Component Type: Ceramic Capacitor
footprint CAPC160X80X90L35 (EIA 0603 (1608) T0.90 1.60x0.80x0.90)
pins: 1, 2

## CMP-00010-6
designator R??, comment Resistance: 10k  (hidden comment: RC0402FR-0710KL)
RES 10K OHM 1% 1/16W 0402; Manufacturer: YAGEO; Op Temp max: 155°C; Op Temp min: -55°C; Power: 63mW; Temperature Coefficient: ±100ppm; ComponentLink3URL: https://www.digikey.com/en/products/detail/yageo/RC0402FR-0710KL/726523; ComponentLink1Description: Datasheet; Height max: 400µm; ComponentLink3Description: Digikey; ComponentLink2URL: https://www2.mouser.com/ProductDetail/YAGEO/RC0402FR-0710KL?qs=%2Fha2pyFaduhjtLcYvKXQ8NAGbRXkQ%2Fwl6RsvWHeV66MSeqLhkcF3rg%3D%3D; Ratings: -; MPN: RC0402FR-0710KL; ComponentLink1URL: https://www.yageo.com/upload/media/product/productsearch/datasheet/rchip/PYu-RC_Group_51_RoHS_L_12.pdf; ComponentLink2Description: Mouser; Mounting Type: SM; Tolerance: 1%; Composition: Thick Film; Size: 1.00mm x 0.50mm; Package: 0402 (1005 Metric); Component Type: Chip Resistor
footprint RESC100X50X40L25 (EIA 0402 (1005) T0.40 1.00x0.50x0.40)
pins: 1, 2

## CMP-00121-6
designator R??, comment Resistance: 100k  (hidden comment: RC0402FR-07100KL)
RES 100K OHM 1% 1/16W 0402; Manufacturer: YAGEO; Op Temp min: -55°C; Op Temp max: 155°C; Power: 63mW; Temperature Coefficient: ±100ppm; ComponentLink2Description: Mouser; Mounting Type: SM; Composition: Thick Film; ComponentLink3URL: https://www.digikey.com/en/products/detail/yageo/RC0402FR-07100KL/726526; Size: 1.00mm x 0.50mm; MPN: RC0402FR-07100KL; Tolerance: 1%; Ratings: -; ComponentLink1Description: Datasheet; ComponentLink2URL: https://eu.mouser.com/ProductDetail/YAGEO/RC0402FR-07100KL?qs=%2Fha2pyFaduhjtLcYvKXQ8IUndG0u%252BuCx1gxMxvN%252Btd7iB7mgHWsSbw%3D%3D; Package: 0402 (1005 Metric); ComponentLink1URL: https://www.yageo.com/upload/media/product/productsearch/datasheet/rchip/PYu-RC_Group_51_RoHS_L_12.pdf; ComponentLink3Description: Digikey; Height max: 400µm; Component Type: Chip Resistor
footprint RESC100X50X40L25 (EIA 0402 (1005) T0.40 1.00x0.50x0.40)
pins: 1, 2

## CMP-00125-8
designator R??, comment Resistance: 5.1  (hidden comment: RC0402FR-075R1L)
RES 5.1 OHM 1% 1/16W 0402; Manufacturer: YAGEO; Power: 63mW; Temperature Coefficient: ±200ppm; Op Temp max: 155°C; Op Temp min: -55°C; ComponentLink3URL: https://www.digikey.com/en/products/detail/yageo/RC0402FR-075R1L/5917722; ComponentLink2Description: Mouser; ComponentLink2URL: https://eu.mouser.com/ProductDetail/YAGEO/RC0402FR-075R1L?qs=%2Fha2pyFaduhjtLcYvKXQ8B9EFTm6YmMloHxcmTFokS12j5yrT26S1A%3D%3D; Size: 1.00mm x 0.50mm; ComponentLink3Description: Digikey; Package: 0402 (1005 Metric); Ratings: -; Tolerance: 1%; MPN: RC0402FR-075R1L; ComponentLink1URL: https://www.yageo.com/upload/media/product/productsearch/datasheet/rchip/PYu-RC_Group_51_RoHS_L_12.pdf; Mounting Type: SM; Composition: Thick Film; Height max: 400µm; ComponentLink1Description: Datasheet; Component Type: Chip Resistor
footprint RESC100X50X40L25 (EIA 0402 (1005) T0.40 1.00x0.50x0.40)
pins: 1, 2

## CMP-00419-6
designator R??, comment Resistance: 1.91k  (hidden comment: RC0402FR-071K91L)
RES 1.91K OHM 1% 1/16W 0402; Manufacturer: YAGEO; Op Temp min: -55°C; Temperature Coefficient: ±100ppm; Op Temp max: 155°C; Power: 63mW; ComponentLink2Description: Mouser; ComponentLink1URL: https://www.yageo.com/upload/media/product/productsearch/datasheet/rchip/PYu-RC_Group_51_RoHS_L_12.pdf; ComponentLink3Description: Digikey; Composition: Thick Film; Tolerance: 1%; Ratings: -; Package: 0402 (1005 Metric); Mounting Type: SM; ComponentLink2URL: https://eu.mouser.com/ProductDetail/YAGEO/RC0402FR-071K91L?qs=%2Fha2pyFaduhjtLcYvKXQ8Exvf7RdQuNEJrJL9EjAZgPVltTSbbI12w%3D%3D; MPN: RC0402FR-071K91L; Height max: 400µm; ComponentLink3URL: https://www.digikey.com/en/products/detail/yageo/RC0402FR-071K91L/5280909; Size: 1.00mm x 0.50mm; ComponentLink1Description: Datasheet; Component Type: Chip Resistor
footprint RESC100X50X40L25 (EIA 0402 (1005) T0.40 1.00x0.50x0.40)
pins: 1, 2

## CMP-00427-4
designator C??, comment Capacitance: DNP  (hidden comment: DNP chip cap 0402)
DNP cap 0402; Mounting Type: SM; Package: 0402 (1005 Metric); MPN: DNP; Component Type: Ceramic Capacitor
footprint CAPC100x50x50L25 (EIA 0402 (1005) T0.50 1.00x0.50x0.50)
pins: 1, 2

## CMP-00446-4
designator C??, comment Voltage Rating: 10V  Capacitance: 47µF  (hidden comment: GMC21X5R476M10NT)
CAP CER 47UF 10V X5R 0805; Manufacturer: CAL-CHIP ELECTRONICS, INC.; Op Temp max: 85°C; Tolerance: 20%; Op Temp min: -55°C; Mounting Type: SM; ComponentLink2Description: Mouser; Dielectric: X5R; ComponentLink3URL: https://www.digikey.com/en/products/detail/cal-chip-electronics-inc/GMC21X5R476M10NT/12698064; ComponentLink1URL: http://www.calchipelectronics.com/pdf/gmc_series.pdf; Height max: 1.5mm; ComponentLink2URL: -; Package: 0805 (2012 Metric); Lead Spacing: 0mm; ComponentLink1Description: Datasheet; MPN: GMC21X5R476M10NT; ComponentLink3Description: Digikey; Ratings: -; Size: 2.00mm x 1.25mm; Component Type: Ceramic Capacitor
footprint CAPC200X125X145L50 (EIA 0805 (2012) T1.45 2.00x1.25x1.45)
pins: 1, 2

## CMP-00475-6
designator R??, comment Resistance: 31.6k  (hidden comment: RC0402FR-0731K6L)
RES 31.6K OHM 1% 1/16W 0402; Manufacturer: YAGEO; Power: 63mW; Temperature Coefficient: ±100ppm; Op Temp max: 155°C; Op Temp min: -55°C; ComponentLink2Description: Mouser; Size: 1.00mm x 0.50mm; ComponentLink3URL: https://www.digikey.com/en/products/detail/yageo/RC0402FR-0731K6L/5280975; Composition: Thick Film; Mounting Type: SM; ComponentLink1URL: https://www.yageo.com/upload/media/product/productsearch/datasheet/rchip/PYu-RC_Group_51_RoHS_L_12.pdf; Tolerance: 1%; ComponentLink3Description: Digikey; MPN: RC0402FR-0731K6L; ComponentLink1Description: Datasheet; Ratings: -; ComponentLink2URL: https://eu.mouser.com/ProductDetail/YAGEO/RC0402FR-0731K6L?qs=tQYgeJ5sXdm2wsAqEjplmg%3D%3D; Package: 0402 (1005 Metric); Height max: 400µm; Component Type: Chip Resistor
footprint RESC100X50X40L25 (EIA 0402 (1005) T0.40 1.00x0.50x0.40)
pins: 1, 2

## CMP-00539-4
designator R??, comment Resistance: 1M  (hidden comment: RC0402FR-071ML)
RES 1M OHM 1% 1/16W 0402; Manufacturer: YAGEO; Op Temp max: 155°C; Op Temp min: -55°C; Temperature Coefficient: ±100ppm; Power: 63mW; Ratings: -; ComponentLink2URL: https://eu.mouser.com/ProductDetail/YAGEO/RC0402FR-071ML?qs=V1yeUXFNrknfoI4987wfBQ%3D%3D; Height max: 400µm; ComponentLink1Description: Datasheet; Mounting Type: SM; ComponentLink2Description: Mouser; Package: 0402 (1005 Metric); ComponentLink3URL: https://www.digikey.com/en/products/detail/yageo/RC0402FR-071ML/726515; MPN: RC0402FR-071ML; Tolerance: 1%; ComponentLink1URL: https://www.yageo.com/upload/media/product/productsearch/datasheet/rchip/PYu-RC_Group_51_RoHS_L_12.pdf; Composition: Thick Film; Size: 1.00mm x 0.50mm; ComponentLink3Description: Digikey; Component Type: Chip Resistor
footprint RESC100X50X40L25 (EIA 0402 (1005) T0.40 1.00x0.50x0.40)
pins: 1, 2

## CMP-00547-4
designator R??, comment Resistance: 49.9k  (hidden comment: RC0402FR-0749K9L)
RES 49.9K OHM 1% 1/16W 0402; Manufacturer: YAGEO; Temperature Coefficient: ±100ppm; Power: 63mW; Op Temp min: -55°C; Op Temp max: 155°C; ComponentLink1Description: Datasheet; Composition: Thick Film; Ratings: -; ComponentLink2URL: https://eu.mouser.com/ProductDetail/YAGEO/RC0402FR-0749K9L?qs=QT1cPpUoD8GsWnpgOWR2jA%3D%3D; ComponentLink3URL: https://www.digikey.com/en/products/detail/yageo/RC0402FR-0749K9L/726620; ComponentLink2Description: Mouser; MPN: RC0402FR-0749K9L; Package: 0402 (1005 Metric); Mounting Type: SM; ComponentLink1URL: https://www.yageo.com/upload/media/product/productsearch/datasheet/rchip/PYu-RC_Group_51_RoHS_L_12.pdf; Size: 1.00mm x 0.50mm; Tolerance: 1%; ComponentLink3Description: Digikey; Height max: 400µm; Component Type: Chip Resistor
footprint RESC100X50X40L25 (EIA 0402 (1005) T0.40 1.00x0.50x0.40)
pins: 1, 2

## CMP-00590-3
designator R??, comment Resistance: 274k  (hidden comment: RC0402FR-07274KL)
RES 274K OHM 1% 1/16W 0402; Manufacturer: YAGEO; Op Temp min: -55°C; Op Temp max: 155°C; Temperature Coefficient: ±100ppm; Power: 63mW; MPN: RC0402FR-07274KL; ComponentLink3Description: Digikey; Ratings: -; ComponentLink2Description: Mouser; ComponentLink1URL: https://www.yageo.com/upload/media/product/productsearch/datasheet/rchip/PYu-RC_Group_51_RoHS_L_12.pdf; Size: 1.00mm x 0.50mm; ComponentLink1Description: Datasheet; Tolerance: 1%; Height max: 400µm; Package: 0402 (1005 Metric); Composition: Thick Film; ComponentLink3URL: https://www.digikey.com/en/products/detail/yageo/RC0402FR-07274KL/5280943?s=N4IgTCBcDaIEoGEAMAWJYBicC0SDsYeKA0gDIgC6AvkA; Mounting Type: SM; ComponentLink2URL: https://eu.mouser.com/ProductDetail/YAGEO/RC0402FR-07274KL?qs=UOUeRUa%252B8WkXvujgT9w63w%3D%3D; Component Type: Chip Resistor
footprint RESC100X50X40L25 (EIA 0402 (1005) T0.40 1.00x0.50x0.40)
pins: 1, 2

## CMP-00630-3
designator R??, comment Resistance: 178k  (hidden comment: RC0402FR-07178KL)
RES 178K OHM 1% 1/16W 0402; Manufacturer: YAGEO; Temperature Coefficient: ±100ppm; Power: 63mW; Op Temp min: -55°C; Op Temp max: 155°C; Size: 1.00mm x 0.50mm; Composition: Thick Film; ComponentLink3URL: https://www.digikey.com/en/products/detail/yageo/RC0402FR-07178KL/5280870?s=N4IgTCBcDaIEoGEAMAWJYBicC0SDsAjHgBwDSAMiALoC%2BQA; Tolerance: 1%; Package: 0402 (1005 Metric); ComponentLink3Description: Digikey; ComponentLink1Description: Datasheet; MPN: RC0402FR-07178KL; Mounting Type: SM; Ratings: -; ComponentLink1URL: https://www.yageo.com/upload/media/product/productsearch/datasheet/rchip/PYu-RC_Group_51_RoHS_L_12.pdf; ComponentLink2URL: https://eu.mouser.com/ProductDetail/YAGEO/RC0402FR-07178KL?qs=UOUeRUa%252B8WmEoK18p4ojZQ%3D%3D; Height max: 400µm; ComponentLink2Description: Mouser; Component Type: Chip Resistor
footprint RESC100X50X40L25 (EIA 0402 (1005) T0.40 1.00x0.50x0.40)
pins: 1, 2